# Altium schematic symbol library IMU - BMI270.SchLib: 1 symbol
Pins are listed as number, name and electrical type; pins without a type are passive.

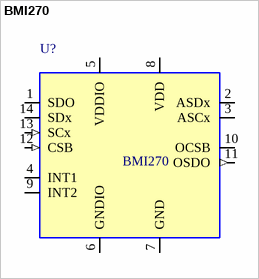
[diagram p0: symbol BMI270]

## BMI270
designator U?
Accelerometer, Gyroscope, 6 Axis Sensor I2C, SPI Output; Manufacturer: Bosch Sensortec; Manufacturer Part Number: BMI270; Supplier 1: DigiKey; Supplier Part Number 1: 828-1091-1-ND; Supplier 2: LCSC; Supplier Part Number 2: C2836813; Category: IMUs (Inertial Measurement Units); Case/Package: 14-VFLGA; Supplier Device Package: 14-LGA (2.5x3); Operating Temperature: -40°C ~ 85°C; Lifecycle Status: Active; ComponentLink1Description: Datasheet; ComponentLink1URL: https://www.bosch-sensortec.com/media/boschsensortec/downloads/datasheets/bst-bmi270-ds000.pdf; ComponentLink2Description: DigiKey; ComponentLink2URL: https://www.digikey.com/en/products/result?keywords=BMI270
footprint LGA-14 2.5x3.0 - BOSCH (Huella LGA-14 2.5x3.0 - BOSCH)
pins: 1 SDO (io), 2 ASDx (io), 3 ASCx (io), 4 INT1 (io), 5 VDDIO (power), 6 GNDIO (power), 7 GND (power), 8 VDD (power), 9 INT2 (io), 10 OCSB, 11 OSDO (out), 12 CSB (in), 13 SCx (in), 14 SDx (io)